# Altium schematic symbol library Clema_Power_IC.SchLib: 4 symbols
Pins are listed as number, name and electrical type; pins without a type are passive.

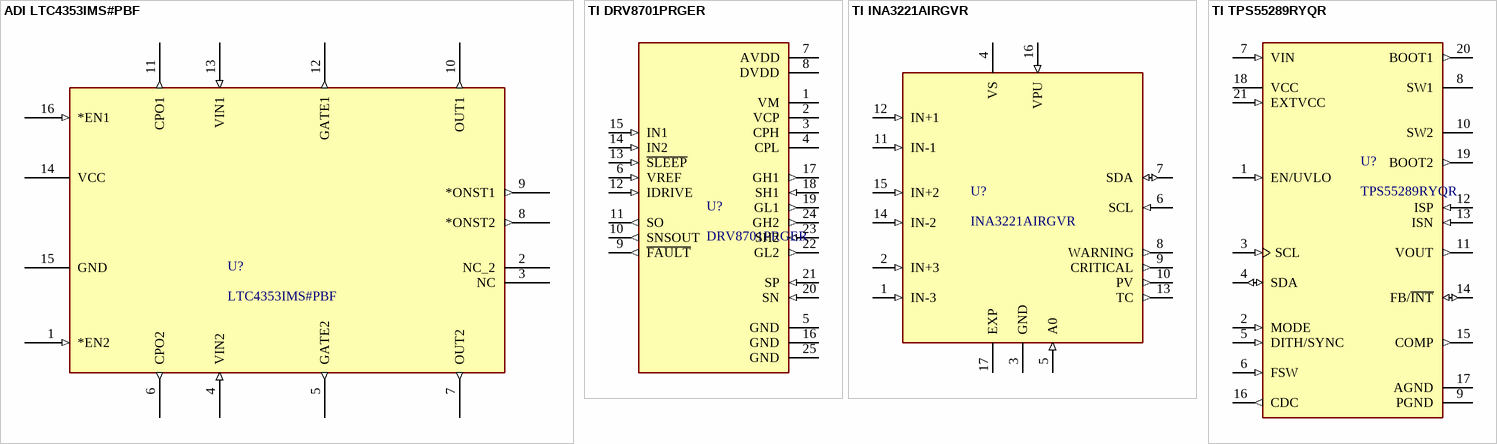
[diagram p0: symbols ADI LTC4353IMS#PBF to TI TPS55289RYQR]

## ADI LTC4353IMS#PBF
designator U?, comment LTC4353IMS#PBF
MSOP-16 OR Controllers, Ideal Diodes RoHS; Manufacturer: ADI; Manufacturer Part Number: LTC4353IMS#PBF; LCSC Part Number: C117315; Mouser Part Number: 584-LTC4353IMS#PBF; Package: MSOP-16; Type: SMD
footprint LTC4353IMS#PBF_MSOP-16
pins: 1 *EN2 (in), 2 NC_2, 3 NC, 4 VIN2 (in), 5 GATE2 (out), 6 CPO2 (out), 7 OUT2 (out), 8 *ONST2 (out), 9 *ONST1 (out), 10 OUT1 (out), 11 CPO1 (out), 12 GATE1 (out), 13 VIN1 (in), 14 VCC (power), 15 GND (power), 16 *EN1 (in)

## TI DRV8701PRGER
designator U?, comment DRV8701PRGER
Brushed DC Motor Full-Bridge Gate Driver; Manufacturer: TI; Manufacturer Part Number: DRV8701PRGER; DigiKey Part Number: 296-46293-2-ND; LCSC Part Number: C114178; Mouser Part Number: 595-DRV8701PRGER; Package: VQFN-24-EP(4x4); Type: SMD
footprint DRV8701PRGER_VQFN-24-EP(4x4)
pins: 1 VM (power), 2 VCP (power), 3 CPH (power), 4 CPL (power), 5 GND (power), 6 VREF (in), 7 AVDD (power), 8 DVDD (power), 9 ~{FAULT} (out), 10 SNSOUT (out), 11 SO (out), 12 IDRIVE (in), 13 ~{SLEEP} (in), 14 IN2 (in), 15 IN1 (in), 16 GND (power), 17 GH1 (out), 18 SH1 (in), 19 GL1 (out), 20 SN (in), 21 SP (in), 22 GL2 (out), 23 SH2 (in), 24 GH2 (out), 25 GND (power)

## TI INA3221AIRGVR
designator U?, comment INA3221AIRGVR
Triple-Channel, High-Side Measurement, Shunt and Bus Voltage Monitor with I²C- and SMBUS-Compatible Interface; Manufacturer: TI; Manufacturer Part Number: INA3221AIRGVR; DigiKey Part Number: 296-INA3221AIRGVRTR-ND; LCSC Part Number: C181255; Mouser Part Number: 595-INA3221AIRGVR; Package: QFN-16-EP(4x4); Type: SMD
footprint INA3221AIRGVR_QFN-16-EP(4x4)
pins: 1 IN-3 (in), 2 IN+3 (in), 3 GND (power), 4 VS (power), 5 A0 (in), 6 SCL (in), 7 SDA (io), 8 WARNING (out), 9 CRITICAL (out), 10 PV (out), 11 IN-1 (in), 12 IN+1 (in), 13 TC (out), 14 IN-2 (in), 15 IN+2 (in), 16 VPU (in), 17 EXP (power)

## TI TPS55289RYQR
designator U?, comment TPS55289RYQR
TPS55289 Synchronous Buck-Boost Converter; Manufacturer: TI; Manufacturer Part Number: TPS55289RYQR; DigiKey Part Number: 296-TPS55289RYQRTR-ND; LCSC Part Number: C5942077; Package: VQFN-HR-21(3x5); Type: SMD
footprint TPS55289RYQR_VQFN-HR-21(3x5)
pins: 1 EN/UVLO (in), 2 MODE (in), 3 SCL (in), 4 SDA (io), 5 DITH/SYNC (in), 6 FSW (in), 7 VIN (in), 8 SW1, 9 PGND (power), 10 SW2, 11 VOUT (out), 12 ISP (in), 13 ISN (in), 14 FB/~{INT} (io), 15 COMP (out), 16 CDC (out), 17 AGND (power), 18 VCC (power), 19 BOOT2 (out), 20 BOOT1 (out), 21 EXTVCC (in)